# Altium schematic symbol library Regulators.SchLib: 16 symbols
Pins are listed as number, name and electrical type; pins without a type are passive.

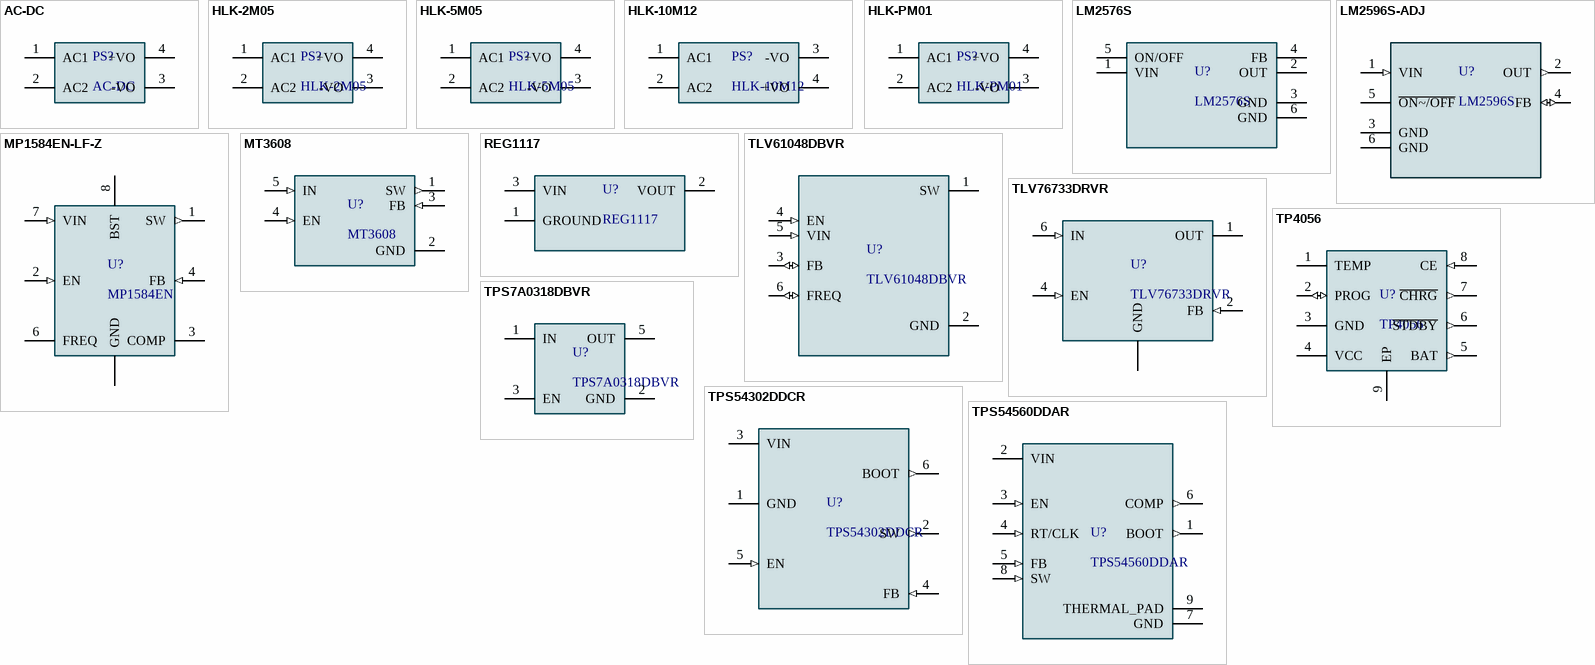
[diagram p0: symbols AC-DC to TPS54560DDAR]

## AC-DC
designator PS?
AC DC Module 12V 450mA - Type A; MP: HLK-2M05; MF: Hi-link; SnapEDA_Link: https://www.snapeda.com/parts/HLK-2M05/Hi-link/view-part/?ref=snap; Package: Package; Check_prices: https://www.snapeda.com/parts/HLK-2M05/Hi-link/view-part/?ref=eda; Value: *; Availability: Not in stock; Price: None
footprint AC-DC-Module (AC DC Module 12V 450mA - Type A)
pins: 1 AC1 (power), 2 AC2 (power), 3 -VO (power), 4 +VO (power)

## HLK-2M05
designator PS?
2W Subminiature Series Module Power Supply; MF: Hi-link; SnapEDA_Link: https://www.snapeda.com/parts/HLK-2M05/Hi-link/view-part/?ref=snap; Package: Package; Check_prices: https://www.snapeda.com/parts/HLK-2M05/Hi-link/view-part/?ref=eda; MP: HLK-2M05; Value: *; Availability: Not in stock; Price: None
footprint HLK-2M05
pins: 1 AC1 (power), 2 AC2 (power), 3 -VO (power), 4 +VO (power)

## HLK-5M05
designator PS?
AC DC 220V to 5V 5W 5Watt Isolated Switching Step-Down Power Supply Module Converter; MF: Hi-link; Check_prices: https://www.snapeda.com/parts/HLK-5M05/Hi-link/view-part/?ref=eda; SnapEDA_Link: https://www.snapeda.com/parts/HLK-5M05/Hi-link/view-part/?ref=snap; Price: None; Availability: Not in stock; Package: Package; MP: HLK-5M05; Value: *
footprint HLK-5M05
pins: 1 AC1 (power), 2 AC2 (power), 3 -VO (power), 4 +VO (power)

## HLK-10M12
designator PS?
10W Ultra-Compact Power Module; MF: Hi-link; SnapEDA_Link: https://www.snapeda.com/parts/HLK-10M12/Hi-link/view-part/?ref=snap; Package: Package; Value: *; MP: HLK-10M12; Check_prices: https://www.snapeda.com/parts/HLK-10M12/Hi-link/view-part/?ref=eda
footprint HLK-10M12
pins: 1 AC1 (power), 2 AC2 (power), 3 -VO (power), 4 +VO (power)

## HLK-PM01
designator PS?
The HLK-PM01 is a small size low cost AC to DC converter which can take in 110V/220V AC at 50/60 Hz and give 5V 3W output. The module is can be used in designs which run on 5V and needs to be powered form the AC mains.; MF: Hi-link; SnapEDA_Link: https://www.snapeda.com/parts/hlk-pm01/Hi-link/view-part/?ref=snap; Package: None; Value: *; MP: hlk-pm01; Check_prices: https://www.snapeda.com/parts/hlk-pm01/Hi-link/view-part/?ref=eda
footprint HLK-PM01
pins: 1 AC1 (power), 2 AC2 (power), 3 -VO (power), 4 +VO (power)

## LM2576S
designator U?
he LM2576S is a series of monolithic integrated circuits that function as step-down (buck) switching voltage regulators, typically capable of driving a 3A load.; MF: Texas Instruments; MP: LM2576S-12; SnapEDA_Link: https://www.snapeda.com/parts/LM2576S-12/Texas+Instruments/view-part/?ref=snap; Package: TO-263-5 Texas Instruments; Value: *; Check_prices: https://www.snapeda.com/parts/LM2576S-12/Texas+Instruments/view-part/?ref=eda
footprint LM2576S
pins: 1 VIN (power), 2 OUT (power), 3 GND (power), 4 FB (power), 5 ON/OFF (power), 6 GND (power)

## LM2596S-ADJ
designator U?, comment LM2596S
Buck Switching Regulator IC Positive Adjustable 1.2V 1 Output 3A TO-263-6, DÂ²Pak (5 Leads + Tab), TO-263BA; MF: UMW; MP: LM2596S-ADJ; SnapEDA_Link: https://www.snapeda.com/parts/LM2596S-ADJ/Umwelt+Sensor+Teknik/view-part/?ref=snap; Package: None; Value: *; Check_prices: https://www.snapeda.com/parts/LM2596S-ADJ/Umwelt+Sensor+Teknik/view-part/?ref=eda
footprint LM2596S (TO170P1435X465-6N)
pins: 1 VIN (in), 2 OUT (out), 3 GND, 4 FB (io), 5 ~{ON~/OFF}, 6 GND

## MP1584EN-LF-Z
designator U?, comment MP1584EN
Buck Switching Regulator IC Positive Adjustable 0.8V 1 Output 3A 8-SOIC (0.154, 3.90mm Width) Exposed Pad; MF: Monolithic Power Systems; MP: MP1584ENLFZ; SnapEDA_Link: https://www.snapeda.com/parts/MP1584ENLFZ/Monolithic+Power+Systems/view-part/?ref=snap; Package: SOIC-8 Monolithic Power Systems; Value: *; Check_prices: https://www.snapeda.com/parts/MP1584ENLFZ/Monolithic+Power+Systems/view-part/?ref=eda
footprint MP1584ENLFZ (SOIC127P600X170-9N)
pins: 1 SW (out), 2 EN (in), 3 COMP, 4 FB (in), 5 GND (power), 6 FREQ, 7 VIN (in), 8 BST, 9 EP (power)

## MT3608
designator U?
High Efficiency 1.2MHz2A Step Up Converter; MF: Aerosemi Technology Co., Ltd; Price: None; Availability: Not in stock; Package: Package; MP: MT3608; Value: *; SnapEDA_Link: https://www.snapeda.com/parts/MT3608/Aerosemi+Technology+Co.%252C+Ltd/view-part/?ref=snap; Check_prices: https://www.snapeda.com/parts/MT3608/Aerosemi+Technology+Co.%252C+Ltd/view-part/?ref=eda
footprint MT3608 (SOT95P280X145-6N)
pins: 1 SW (out), 2 GND (power), 3 FB (in), 4 EN (in), 5 IN (in)

## REG1117
designator U?
800-mA, 15-V, linear voltage regulator 4-SOT-223 -40 to 125; MP: REG1117-3.3; MF: Texas Instruments; Mouser-Purchase-URL: https://snapeda.com/shop?store=Mouser&id=11155; Availability: Good; Price: None; DigiKey-Purchase-URL: https://snapeda.com/shop?store=DigiKey&id=11155; Package: SOT-223-4 Texas Instruments; Value: *; SnapEDA_Link: https://www.snapeda.com/parts/REG1117-3.3/Texas%20Instruments/view-part/11155/?ref=snap; Arrow_Electronics-Purchase-URL: https://snapeda.com/shop?store=Arrow+Electronics&id=11155; Texas_Instruments-Purchase-URL: https://snapeda.com/shop?store=Texas+Instruments&id=11155
footprint REG1117 (SOT230P700X180-4N)
pins: 1 GROUND (power), 2 VOUT (power), 3 VIN (power)

## TLV61048DBVR
designator U?
14-V output voltage non-synchronous boost converter in SOT-23 package; MF: Texas Instruments; SnapEDA_Link: https://www.snapeda.com/parts/TLV61048DBVR/Texas+Instruments/view-part/?ref=snap; Package: SOT-23-6 Texas Instruments; Value: *; MP: TLV61048DBVR; Check_prices: https://www.snapeda.com/parts/TLV61048DBVR/Texas+Instruments/view-part/?ref=eda
footprint TLV61048DBVR (SOT95P280X145-6N)
pins: 1 SW (power), 2 GND (power), 3 FB (io), 4 EN (in), 5 VIN (in), 6 FREQ (io)

## TLV76733DRVR
designator U?
Adjustable- and fixed-output, 1-A, 16-V, positive-voltage low-dropout (LDO) linear regulator; MF: Texas Instruments; SnapEDA_Link: https://www.snapeda.com/parts/TLV76733DRVR/Texas+Instruments/view-part/?ref=snap; Package: WSON-6 Texas Instruments; Value: *; MP: TLV76733DRVR; Check_prices: https://www.snapeda.com/parts/TLV76733DRVR/Texas+Instruments/view-part/?ref=eda
footprint TLV76733DRVR (SON65P200X200X80-7N)
pins: 1 OUT (power), 2 FB (in), 3 GND (power), 4 EN (in), 5 GND (power), 6 IN (in), 7 GND (power)

## TP4056
designator U?
Complete single cell Li-Ion battery with a constant current / constant voltage linear charger; MF: NanJing Top Power ASIC Corp.; Check_prices: https://www.snapeda.com/parts/TP4056/NanJing+Top+Power+ASIC+Corp./view-part/?ref=eda; SnapEDA_Link: https://www.snapeda.com/parts/TP4056/NanJing+Top+Power+ASIC+Corp./view-part/?ref=snap; Price: None; Availability: Not in stock; Package: Package; MP: TP4056; Value: *
footprint TP4056 (SOP127P600X175-9N)
pins: 1 TEMP (power), 2 PROG (io), 3 GND (power), 4 VCC (power), 5 BAT (out), 6 ~{STDBY} (out), 7 ~{CHRG} (out), 8 CE (in), 9 EP

## TPS7A0318DBVR
designator U?
Fixed LDO Voltage Regulator 1.8V 200mA SOT-23-5; MF: Microchip; MP: MIC5205-5.0YM5-TR; Value: *; SnapEDA_Link: https://www.snapeda.com/parts/MIC5205-5.0YM5-TR/Microchip/view-part/?ref=snap; Purchase-URL: https://pricing.snapeda.com/search/part/MIC5205-5.0YM5-TR/?ref=eda; Availability: In Stock; Price: None; Package: SOT-23-5 Microchip; Check_prices: https://www.snapeda.com/parts/MIC5205-5.0YM5-TR/Microchip/view-part/?ref=eda
footprint TPS7A0318DBVR (SOT95P280X145-5N)
pins: 1 IN (power), 2 GND (power), 3 EN (power), 5 OUT (power)

## TPS54302DDCR
designator U?
4.5-V to 28-V Input, 3-A Output, EMI Friendly Synchronous Step-Down Converter; MF: Texas Instruments; Package: SOT-23-THN-6 Texas Instruments; Price: None; Check_prices: https://www.snapeda.com/parts/TPS54302DDCR/Texas+Instruments/view-part/?ref=eda; Value: *; SnapEDA_Link: https://www.snapeda.com/parts/TPS54302DDCR/Texas+Instruments/view-part/?ref=snap; MP: TPS54302DDCR; Availability: In Stock; Purchase-URL: https://pricing.snapeda.com/search?q=TPS54302DDCR&ref=eda
footprint TPS54302DDCR (SOT95P280X110-6N)
pins: 1 GND (power), 2 SW (out), 3 VIN (power), 4 FB (in), 5 EN (in), 6 BOOT (out)

## TPS54560DDAR
designator U?
4.5V to 60 V input, 5 A step-down converter with Eco-Mode 8-SO PowerPAD -40 to 125; MF: Texas Instruments; Purchase-URL: https://pricing.snapeda.com/search/part/TPS54560DDAR/?ref=eda; Value: *; SnapEDA_Link: https://www.snapeda.com/parts/TPS54560DDAR/Texas%20Instruments/view-part/231249/?ref=snap; Package: HSOIC-8 Texas Instruments; Availability: Warning; Price: None; MP: TPS54560DDAR
footprint TPS54560DDAR
pins: 1 BOOT (out), 2 VIN (power), 3 EN (in), 4 RT/CLK (in), 5 FB (in), 6 COMP (out), 7 GND (power), 8 SW (in), 9 THERMAL_PAD (power)